# Altium integrated library MPPT_Charger_NB_IoT.IntLib: 60 symbols
Pins are listed as number, name and electrical type; pins without a type are passive.

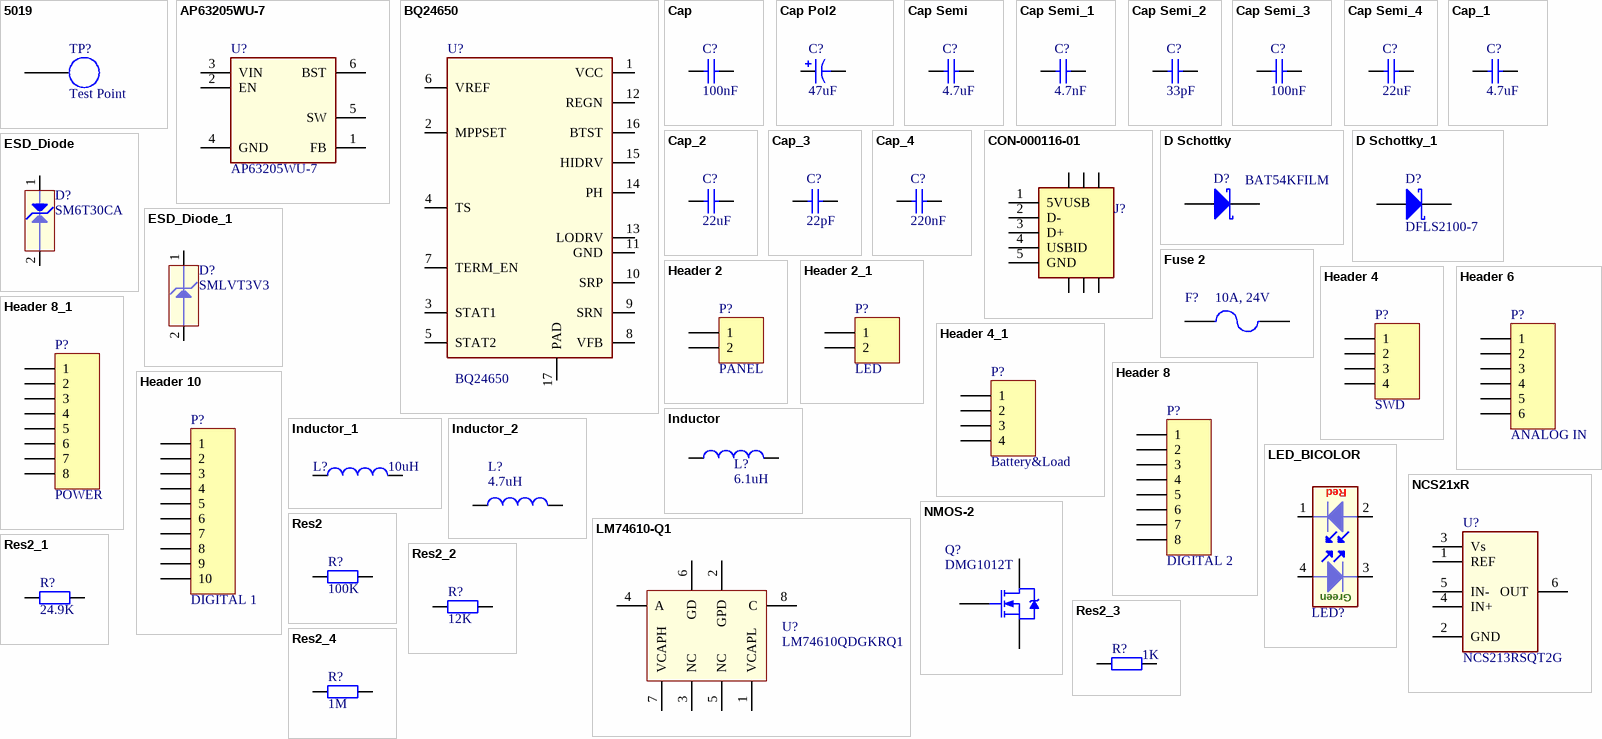
[diagram p0: symbols 5019 to Res2_4]

## 5019
designator TP?, comment Test Point
SMD Test Point; Manufacturer: Keystone Electronics; Manufacturer Part No.: 5019; Part Description: SMT Test Point; Specification: 3.81*2.03; Value: 5019; Supplier: DigiKey; Supplier part number: 36-5019CT-ND; Link: https://www.digikey.com/product-detail/en/keystone-electronics/5019/36-5019CT-ND/3907344
footprint 5019_keystone (Keystone Test Point 5019)
pins: 1

## AP63205WU-7
designator U?
SYNCHRONOUS BUCK WITH ENHANCED EMI REDUCTION; Manufacturer: Diodes Incorporated; Part Description: Buck Switching Regulator; Specification: 32V in, 5V, 2A; Link: https://www.digikey.com/product-detail/en/diodes-incorporated/AP63205WU-7/AP63205WU-7DICT-ND/9858428; Manufacturer Part No.: AP63205WU-7; Supplier: DigiKey; Supplier part number: AP63205WU-7DICT-ND; Value: AP63205WU-7
footprint SOT23-6_custom
pins: 1 FB, 2 EN, 3 VIN, 4 GND, 5 SW, 6 BST

## BQ24650
designator U?
Maximum Power Point Charger; Manufacturer: TI; Manufacturer Part No.: BQ24650RVAR; Part Description: Battery Charge Controller; Value: BQ24650RVAT; Specification: 28V, MPPT; Link: https://www.digikey.com/product-detail/en/texas-instruments/BQ24650RVAR/296-46287-1-ND/7033462; Supplier: DigiKey; Supplier part number: 296-46287-1-ND
footprint QFN-16_custom (Plastic Quad Flatpack 16 pins, 0.5 mm pitch)
pins: 1 VCC (power), 2 MPPSET (power), 3 STAT1 (power), 4 TS (power), 5 STAT2 (power), 6 VREF (power), 7 TERM_EN (power), 8 VFB (power), 9 SRN (power), 10 SRP (power), 11 GND (power), 12 REGN (power), 13 LODRV (power), 14 PH (power), 15 HIDRV (power), 16 BTST (power), 17 PAD (power)

## Cap
designator C?, comment value 100nF  (hidden comment: Capacitor ceramic)
Manufacturer: TDK Corporation; Manufacturer Part No.: CGA2B3X7R1V104K050BB; Part Description: Ceramic Capacitor; Specification: X7R, 35V, 10%; Link: https://www.digikey.com/product-detail/en/tdk-corporation/CGA2B3X7R1V104K050BB/445-6901-1-ND/2672919; Supplier: DigiKey; Supplier part number: 445-6901-1-ND
simulation model CAP (Capacitor)
signal-integrity model Cap
footprint C0402 (Chip Capacitor, 2-Leads, Body 1,0x0,5mm, IPC High Density)
pins: 1, 2

## Cap Pol2
designator C?, comment value 47uF  (hidden comment: Capacitor Tantalum)
Manufacturer: AVX Corporation; Manufacturer Part No.: TAJD476K016RNJ; Specification: TANT, 16V, 10%; Link: https://www.digikey.com/product-detail/en/avx-corporation/TAJD476K016RNJ/478-1739-1-ND/564771; Part Description: Capacitor Tantalum; Supplier: DigiKey; Supplier part number: 478-1739-1-ND
simulation model CAP (Capacitor)
signal-integrity model Cap Pol
footprint EIA-7343-31 (Chip Capacitor, Case D, 2-Leads, Body 7,3x4,3mm, IPC Medium Density)
pins: 1, 2
1 alternate drawing of the same symbol

## Cap Semi
designator C?, comment value 4.7uF  (hidden comment: Capacitor ceramic)
Manufacturer: Murata Electronics; Manufacturer Part No.: GRM219R6YA475KA73D; Part Description: Ceramic Capacitor; Specification: X5R, 35V, 10%; Supplier: DigiKey; Supplier part number: 490-7208-1-ND; Link: https://www.digikey.com/product-detail/en/murata-electronics/GRM219R6YA475KA73D/490-7208-1-ND/3900454
simulation model CAP (Semiconductor Capacitor)
signal-integrity model Cap Semi
footprint C0805 (Chip Capacitor, Body 2.0x1.3mm, IPC High Density)
pins: 1, 2

## Cap Semi_1
designator C?, comment value 4.7nF  (hidden comment: Capacitor ceramic)
Manufacturer: Yageo; Manufacturer Part No.: AC0402KRX7R9BB472; Part Description: Ceramic Capacitor; Specification: X7R, 50V, 10%; Supplier: DigiKey; Supplier part number: 311-3030-1-ND; Link: https://www.digikey.com/product-detail/en/yageo/AC0402KRX7R9BB472/311-3030-1-ND/6643281
simulation model CAP (Semiconductor Capacitor)
signal-integrity model Cap Semi
footprint C0402 (Chip Capacitor, 2-Leads, Body 1,0x0,5mm, IPC High Density)
pins: 1, 2

## Cap Semi_2
designator C?, comment value 33pF  (hidden comment: Capacitor ceramic)
Manufacturer: Yageo; Manufacturer Part No.: CC0402JRNPO9BN330; Part Description: Ceramic Capacitor; Specification: NP0, 50V, 5%; Supplier: DigiKey; Supplier part number: 311-1020-1-ND; Link: https://www.digikey.com/product-detail/en/yageo/CC0402JRNPO9BN330/311-1020-1-ND/302937
simulation model CAP (Semiconductor Capacitor)
signal-integrity model Cap Semi
footprint C0402 (Chip Capacitor, 2-Leads, Body 1,0x0,5mm, IPC High Density)
pins: 1, 2

## Cap Semi_3
designator C?, comment value 100nF  (hidden comment: Capacitor ceramic)
Manufacturer: TDK Corporation; Manufacturer Part No.: CGA2B3X7R1V104K050BB; Part Description: Ceramic Capacitor; Specification: X7R, 35V, 10%; Supplier: DigiKey; Supplier part number: 445-6901-1-ND; Link: https://www.digikey.com/product-detail/en/tdk-corporation/CGA2B3X7R1V104K050BB/445-6901-1-ND/2672919
simulation model CAP (Semiconductor Capacitor)
signal-integrity model Cap Semi
footprint C0402 (Chip Capacitor, 2-Leads, Body 1,0x0,5mm, IPC High Density)
pins: 1, 2

## Cap Semi_4
designator C?, comment value 22uF  (hidden comment: Capacitor ceramic)
Manufacturer: Taiyo Yuden; Manufacturer Part No.: GMK325BJ226MM-P; Part Description: Ceramic Capacitor; Specification: X5R, 35V, 20%; Supplier: DigiKey; Supplier part number: 587-5853-1-ND; Link: https://www.digikey.com/product-detail/en/taiyo-yuden/GMK325BJ226MM-P/587-5853-1-ND/7674973
simulation model CAP (Semiconductor Capacitor)
signal-integrity model Cap Semi
footprint C1210 (Chip Capacitor, Body 3.2x2.5mm, IPC High Density)
pins: 1, 2

## Cap_1
designator C?, comment value 4.7uF  (hidden comment: Capacitor ceramic)
Manufacturer: Murata Electronics; Manufacturer Part No.: GRM219R6YA475KA73D; Part Description: Ceramic Capacitor; Specification: X5R, 35V, 10%; Link: https://www.digikey.com/product-detail/en/murata-electronics/GRM219R6YA475KA73D/490-7208-1-ND/3900454; Supplier: DigiKey; Supplier part number: 490-7208-1-ND
simulation model CAP (Capacitor)
signal-integrity model Cap
footprint C0805 (Chip Capacitor, Body 2.0x1.3mm, IPC High Density)
pins: 1, 2

## Cap_2
designator C?, comment value 22uF  (hidden comment: Capacitor ceramic)
Manufacturer: Taiyo Yuden; Manufacturer Part No.: GMK325BJ226MM-P; Part Description: Ceramic Capacitor; Specification: X5R, 35V, 20%; Link: https://www.digikey.com/product-detail/en/taiyo-yuden/GMK325BJ226MM-P/587-5853-1-ND/7674973; Supplier: DigiKey; Supplier part number: 587-5853-1-ND
simulation model CAP (Capacitor)
signal-integrity model Cap
footprint C1210 (Chip Capacitor, Body 3.2x2.5mm, IPC High Density)
pins: 1, 2

## Cap_3
designator C?, comment value 22pF  (hidden comment: Capacitor ceramic)
Manufacturer: Yageo; Manufacturer Part No.: CC0402JRNPO9BN220; Part Description: Ceramic Capacitor; Specification: NPO, 50V, 5%; Link: https://www.digikey.com/product-detail/en/yageo/CC0402JRNPO9BN220/311-1018-1-ND/302935; Supplier: DigiKey; Supplier part number: 311-1018-1-ND
simulation model CAP (Capacitor)
signal-integrity model Cap
footprint C0402 (Chip Capacitor, 2-Leads, Body 1,0x0,5mm, IPC High Density)
pins: 1, 2

## Cap_4
designator C?, comment value 220nF  (hidden comment: Capacitor ceramic)
Manufacturer: Yageo; Manufacturer Part No.: CC0402KRX5R8BB224; Part Description: Ceramic Capacitor; Specification: X5R, 25V, 10%; Link: https://www.digikey.com/product-detail/en/yageo/CC0402KRX5R8BB224/311-3341-1-ND/6818311; Supplier: DigiKey; Supplier part number: 311-3341-1-ND
simulation model CAP (Capacitor)
signal-integrity model Cap
footprint C0402 (Chip Capacitor, 2-Leads, Body 1,0x0,5mm, IPC High Density)
pins: 1, 2

## CON-000116-01
designator J?  (value not drawn)
Manufacturer: Amphenol ICC (FCI); Manufacturer Part No.: 10118192-0001LF; Part Description: Micro USB Connector; Specification: Type B; Value: 10118192-0001LF; Supplier: DigiKey; Supplier part number: 609-4613-1-ND; Link: https://www.digikey.com/product-detail/en/amphenol-icc-fci/10118192-0001LF/609-4613-1-ND/2785378
footprint 10118192-0001LF
pins: 1 5VUSB, 2 D-, 3 D+, 4 USBID, 5 GND, 6, 7, 8, 9, 10, 11

## D Schottky
designator D?, comment BAT54KFILM
Schottky Diode; Manufacturer: STMicroelectronics; Part Description: Small signal Schottky diode; Specification: 40V, 0.3A; Manufacturer Part No.: BAT54KFILM; Supplier: DigiKey; Supplier part number: 497-5561-1-ND; Value: BAT54KFILM; Link: https://www.digikey.com/product-detail/en/stmicroelectronics/BAT54KFILM/497-5561-1-ND/1207053
simulation model SKYDIODE (Diode)
signal-integrity model D Schottky
footprint SOD-523
pins: 1 A, 2 K

## D Schottky_1
designator D?, comment DFLS2100-7
Schottky Diode; Manufacturer: Diodes Incorporated; Part Description: DIODE SCHOTTKY; Specification: 100V, 2A; Link: https://www.digikey.com/product-detail/en/diodes-incorporated/DFLS2100-7/DFLS2100-7DICT-ND/3451552; Value: DFLS2100-7; Manufacturer Part No.: DFLS2100-7; Supplier: DigiKey; Supplier part number: DFLS2100-7DICT-ND
simulation model SKYDIODE (Diode)
signal-integrity model D Schottky
footprint PowerDI123
pins: 1 A, 2 K

## ESD_Diode
designator D?, comment SM6T30CA
ESD Diode Symbol; Manufacturer: STMicroelectronics; Manufacturer Part No.: SM6T30CAY; Part Description: TVS DIODE; Specification: 30V, 0.6kW; Value: SM6T30CAY; Link: https://www.digikey.com/product-detail/en/stmicroelectronics/SM6T30CAY/497-10800-1-ND/2442951; Supplier: DigiKey; Supplier part number: 497-10800-1-ND
footprint DO-214AA
pins: 1 PIN1, 2 PIN2

## ESD_Diode_1
designator D?, comment SMLVT3V3
ESD Diode Symbol; Manufacturer: STMicroelectronics; Part Description: Low voltage Transil™; Specification: 3.3V, 0.6kW; Link: https://www.digikey.com/product-detail/en/stmicroelectronics/SMLVT3V3/497-2496-1-ND/603878; Manufacturer Part No.: SMLVT3V3; Supplier: DigiKey; Supplier part number: 497-2496-1-ND; Value: SMLVT3V3
footprint DO-214AA
pins: 1 PIN1, 2 PIN2

## Fuse 2
designator F?, comment 10A, 24V
SMD Fuse; Manufacturer: LITTELFUSE; Part Description: Fast Acting  Fuse; Value: 1206SFH100F/24-2; Specification: 100A; Link: https://uk.farnell.com/littelfuse/1206sfh100f-24-2/fuse-1206-10a/dp/1832124; Manufacturer Part No.: 1206SFH100F/24-2; Supplier: Farnell; Supplier part number: 1832124
simulation model FUSE (Spice Subcircuit)
footprint F1206 (Fuse in 1206 package)
pins: 1, 2

## Header 2
designator P?, comment PANEL
Header, 2-Pin; Manufacturer: SAURO; Part Description: Terminal block; Value: MSG02001; Specification: 2pos. 5mm,  24A, 300V; Link: https://www.sauro.net/products/MSG02001/?product_id=MSG02001; Manufacturer Part No.: MSG02001; Supplier: Rutronik; Supplier part number: COTERM5720
signal-integrity model Connector
footprint TERM2pin5mm (Terminal block 2 pins, 5 mm pitch)
pins: 1, 2

## Header 2_1
designator P?, comment LED
Header, 2-Pin; Manufacturer: SAURO; Part Description: Terminal block; Value: MSG02001; Specification: 2pos. 5mm,  24A, 300V; Link: https://www.sauro.net/products/MSG02001/?product_id=MSG02001; Manufacturer Part No.: MSG02001; Supplier: Rutronik; Supplier part number: COTERM5720
signal-integrity model Connector
footprint TERM2pin5mm (Terminal block 2 pins, 5 mm pitch)
pins: 1, 2

## Header 4
designator P?, comment SWD  (no BOM)
Header, 4-Pin; Manufacturer: Samtec Inc.; Manufacturer Part No.: SLW-104-01-G-S; Part Description: Receptacle Connector Through Hole; Specification: 4 pos. 2.54mm; Value: SLW-104-01-G-S; Link: https://www.digikey.com/products/en?keywords=SLW-104-01-G-S; Supplier: DigiKey; Supplier part number: SAM1089-04-ND
footprint HDR1X4 (Connector; Header; 4 Position)
signal-integrity model Connector
pins: 1, 2, 3, 4

## Header 4_1
designator P?, comment Battery&Load
Header, 4-Pin; Manufacturer: SAURO; Manufacturer Part No.: MSG04001; Part Description: Terminal block; Specification: 4 pos. 5mm,  24A, 300V; Value: MSG04001; Link: https://www.sauro.net/products/MSG04001/?product_id=MSG04001; Supplier: Rutronik; Supplier part number: COTERM6351
signal-integrity model Connector
footprint TERM4pin5mm (Terminal 4 pins, 5 mm pitch)
pins: 1, 2, 3, 4

## Header 6
designator P?, comment ANALOG IN  (no BOM)
Manufacturer: ADAM TECH; Manufacturer Part No.: RS1-06-G; Part Description: Arduino Connector; Specification: 6 pos. 2,54mm; Value: RS1-06-G; Supplier: Rutronik; Supplier part number: CONN2042; Link: http://www.adam-tech.com/products.php
footprint HDR1X6 (Connector; Header; 6 Position)
signal-integrity model Connector
pins: 1, 2, 3, 4, 5, 6

## Header 8
designator P?, comment DIGITAL 2  (no BOM)
Manufacturer: ADAM TECH; Manufacturer Part No.: RS1-08-G; Part Description: Arduino Connector; Specification: 8 pos. 2,54mm; Value: RS1-08-G; Supplier: Rutronik; Supplier part number: CONN2043; Link: http://www.adam-tech.com/products.php
footprint HDR1X8 (Connector; Header; 8 Position)
signal-integrity model Connector
pins: 1, 2, 3, 4, 5, 6, 7, 8

## Header 8_1
designator P?, comment POWER  (no BOM)
Manufacturer: ADAM TECH; Manufacturer Part No.: RS1-08-G; Part Description: Arduino Connector; Specification: 8 pos. 2,54mm; Value: RS1-08-G; Supplier: Rutronik; Supplier part number: CONN2043; Link: http://www.adam-tech.com/products.php
footprint HDR1X8 (Connector; Header; 8 Position)
signal-integrity model Connector
pins: 1, 2, 3, 4, 5, 6, 7, 8

## Header 10
designator P?, comment DIGITAL 1
Manufacturer: SparkFun Electronics; Manufacturer Part No.: PRT-11417; Part Description: ARDUINO STACKABLE HEADER KIT - R; Specification: 10 pos. 2,54mm; Value: PRT-11417; Supplier: DigiKey; Supplier part number: 1568-1413-ND; Link: https://www.digikey.com/product-detail/en/sparkfun-electronics/PRT-11417/1568-1413-ND/6161755
footprint HDR1X10 (Connector; Header; 10 Position)
signal-integrity model Connector
pins: 1, 2, 3, 4, 5, 6, 7, 8, 9, 10

## Inductor
designator L?, comment value 6.1uH  (hidden comment: Power Inductor)
Inductor; Manufacturer: Sumida America Components Inc.; Manufacturer Part No.: CDEP147NP-6R1MC-95; Specification: 11A, 20%; Link: https://www.digikey.com/product-detail/en/sumida-america-components-inc/CDEP147NP-6R1MC-95/308-1608-1-ND/3232383; Part Description: Power Inductor; Supplier: DigiKey; Supplier part number: 308-1608-1-ND
simulation model INDUCTOR (Inductor)
signal-integrity model Inductor
footprint CDEP147
pins: 1, 2

## Inductor_1
designator L?, comment value 10uH  (hidden comment: Power Inductor)
Inductor; Manufacturer: Murata Electronics; Manufacturer Part No.: LQH3NPN100MMEL; Specification: 0.8A, 20%; Link: https://www.digikey.com/product-detail/en/murata-electronics/LQH3NPN100MMEL/490-15945-1-ND/6800610; Part Description: Power Inductor; Supplier: DigiKey; Supplier part number: 490-15945-1-ND
simulation model INDUCTOR (Inductor)
signal-integrity model Inductor
footprint LQH3NP (Size Code 3030 (1212) in mm (in inch), 1.5mm max.Thickness. high performance type)
pins: 1, 2

## Inductor_2
designator L?, comment value 4.7uH  (hidden comment: Power Inductor)
Inductor; Manufacturer: Murata Electronics; Manufacturer Part No.: LQH3NPN4R7MMEL; Specification: 1A, 20%; Supplier: DigiKey; Supplier part number: 490-15954-1-ND; Part Description: Power Inductor; Link: https://www.digikey.com/product-detail/en/murata-electronics/LQH3NPN4R7MMEL/490-15954-1-ND/6800619
simulation model INDUCTOR (Inductor)
signal-integrity model Inductor
footprint LQH3NP (Size Code 3030 (1212) in mm (in inch), 1.5mm max.Thickness. high performance type)
pins: 1, 2

## LED_BICOLOR
designator LED?  (value not drawn)
Manufacturer: OSRAM Opto Semiconductors Inc.; Manufacturer Part No.: LSG T67K-JL-1+HK-1; Part Description: BICOLOR LED RED/GREEN CLEAR; Specification: SMT; Value: LSG T67K-JL-1+HK-1; Link: https://www.digikey.com/product-detail/en/osram-opto-semiconductors-inc/LSG-T67K-JL-1-HK-1/475-3435-1-ND/7908051; Supplier: DigiKey; Supplier part number: 475-3435-1-ND
footprint PLCC-4
pins: 1, 2, 3, 4
text: Red; Green

## LM74610-Q1
designator U?, comment LM74610QDGKRQ1
Smart Diode Controller; Manufacturer: TI; Specification: 42V, 30uA; Link: https://www.digikey.com/product-detail/en/texas-instruments/LM74610QDGKRQ1/296-43067-1-ND/5722225; Manufacturer Part No.: LM74610QDGKRQ1; Part Description: Smart Diode Controller; Supplier: DigiKey; Supplier part number: 296-43067-1-ND; Value: LM74610QDGKRQ1
footprint TSSOP-8 (Plasti Small-Outline Package)
pins: 1 VCAPL, 2 GPD, 3 NC, 4 A, 5 NC, 6 GD, 7 VCAPH, 8 C

## NCS21xR
designator U?, comment NCS213RSQT2G
Current-Shunt Monitor; Manufacturer: ON Semiconductor; Specification: x50, 80uA, 26V; Link: https://www.digikey.com/product-detail/en/on-semiconductor/NCS213RSQT2G/NCS213RSQT2GOSCT-ND/9169239; Manufacturer Part No.: NCS213RSQT2G; Part Description: Current-Shunt Monitor; Supplier: DigiKey; Supplier part number: NCS213RSQT2GOSCT-ND; Value: NCS213RSQT2G
footprint SOT-363
pins: 1 REF, 2 GND, 3 Vs, 4 IN+, 5 IN-, 6 OUT

## NMOS-2
designator Q?, comment DMG1012T
N-Channel Power MOSFET; Manufacturer: Diodes Incorporated; Manufacturer Part No.: DMG1012T-7; Part Description: N-Channel MOSFET; Specification: 20V, 0.63A; Value: DMG1012T-7; Supplier: DigiKey; Supplier part number: DMG1012T-7DICT-ND; Link: https://www.digikey.com/product-detail/en/diodes-incorporated/DMG1012T-7/DMG1012T-7DICT-ND/2181232
simulation model IRF1010 (Spice Subcircuit)
footprint SOT-523_custom
pins: 1 G, 2 D, 3 S

## Res2
designator R?, comment value 100K  (hidden comment: Resistor)
Manufacturer: Yageo; Manufacturer Part No.: RC0402JR-07100KL; Part Description: Thick Film Resistor; Specification: 5% 0,063W; Link: https://www.digikey.com/product-detail/en/yageo/RC0402JR-07100KL/311-100KJRCT-ND/729363; Supplier: DigiKey; Supplier part number: 311-100KJRCT-ND
simulation model RESISTOR (Resistor)
signal-integrity model Res
footprint R0402 (Chip resistor 0402)
pins: 1, 2

## Res2_1
designator R?, comment value 24.9K  (hidden comment: Resistor)
Manufacturer: Yageo; Manufacturer Part No.: RC0402FR-0724K9L; Part Description: Thick Film Resistor; Specification: 1% 0,063W; Link: https://www.digikey.com/product-detail/en/yageo/RC0402FR-0724K9L/311-24-9KLRCT-ND/729514; Supplier: DigiKey; Supplier part number: 311-24.9KLRCT-ND
simulation model RESISTOR (Resistor)
signal-integrity model Res
footprint R0402 (Chip resistor 0402)
pins: 1, 2

## Res2_2
designator R?, comment value 12K  (hidden comment: Resistor)
Manufacturer: Yageo; Manufacturer Part No.: RC0402JR-0712KL; Part Description: Thick Film Resistor; Specification: 5% 0,063W; Link: https://www.digikey.com/product-detail/en/yageo/RC0402JR-0712KL/311-12KJRCT-ND/729370; Supplier: DigiKey; Supplier part number: 311-12KJRCT-ND
simulation model RESISTOR (Resistor)
signal-integrity model Res
footprint R0402 (Chip resistor 0402)
pins: 1, 2

## Res2_3
designator R?, comment value 1K  (hidden comment: Resistor)
Manufacturer: Yageo; Manufacturer Part No.: AC0402JR-071KL; Part Description: Thick Film Resistor; Specification: 5% 0,063W; Link: https://www.digikey.com/product-detail/en/yageo/AC0402JR-071KL/YAG3525CT-ND/6006374; Supplier: DigiKey; Supplier part number: YAG3525CT-ND
simulation model RESISTOR (Resistor)
signal-integrity model Res
footprint R0402 (Chip resistor 0402)
pins: 1, 2

## Res2_4
designator R?, comment value 1M  (hidden comment: Resistor)
Manufacturer: Yageo; Manufacturer Part No.: RC0402FR-071ML; Part Description: Thick Film Resistor; Specification: 1% 0,063W; Supplier: DigiKey; Supplier part number: 311-1.00MLRCT-ND; Link: https://www.digikey.com/product-detail/en/yageo/RC0402FR-071ML/311-1-00MLRCT-ND/729462
simulation model RESISTOR (Resistor)
signal-integrity model Res
footprint R0402 (Chip resistor 0402)
pins: 1, 2

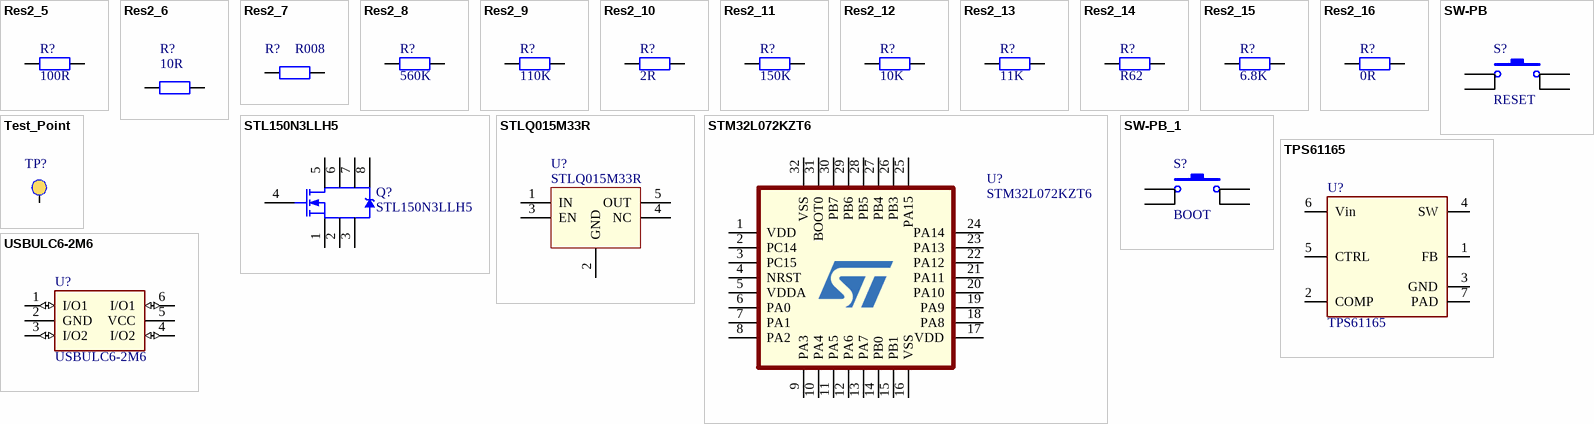
[diagram p1: symbols Res2_5 to USBULC6-2M6]

## Res2_5
designator R?, comment value 100R  (hidden comment: Resistor)
Manufacturer: Yageo; Manufacturer Part No.: SR0402JR-7W100RL; Part Description: Thick Film Resistor; Specification: 5% 0.125W; Supplier: DigiKey; Supplier part number: YAG6156CT-ND; Link: https://www.digikey.com/product-detail/en/yageo/SR0402JR-7W100RL/YAG6156CT-ND/9696610
simulation model RESISTOR (Resistor)
signal-integrity model Res
footprint R0402 (Chip resistor 0402)
pins: 1, 2

## Res2_6
designator R?, comment value 10R  (hidden comment: Resistor)
Manufacturer: Yageo; Manufacturer Part No.: RC0805JR-07510RL; Part Description: Thick Film Resistor; Specification: 5% 0.125W; Link: https://www.digikey.com/product-detail/en/yageo/RC0805JR-07510RL/311-510ARCT-ND/731290; Supplier: DigiKey; Supplier part number: 311-510ARCT-ND
simulation model RESISTOR (Resistor)
signal-integrity model Res
footprint R0805 (Chip Resistor, 2-Leads, Body 2,0x1,3mm, IPC High Density)
pins: 1, 2

## Res2_7
designator R?, comment value R008  (hidden comment: Resistor)
Manufacturer: Rohm Semiconductor; Manufacturer Part No.: PMR50HZPFU8L00; Part Description: Thick Film Resistor; Specification: 1% 1W; Link: https://www.digikey.com/product-detail/en/rohm-semiconductor/PMR50HZPFU8L00/RHM-008ASCT-ND/2094542; Supplier: DigiKey; Supplier part number: RHM.008ASCT-ND
simulation model RESISTOR (Resistor)
signal-integrity model Res
footprint R2010 (Chip Capacitor, 2-Leads, Body 5.3x2.6mm, IPC Medium Density)
pins: 1, 2

## Res2_8
designator R?, comment value 560K  (hidden comment: Resistor)
Manufacturer: Yageo; Manufacturer Part No.: RC0402JR-07560KL; Part Description: Thick Film Resistor; Specification: 5% 0,063W; Link: https://www.digikey.com/product-detail/en/yageo/RC0402JR-07560KL/311-560KJRCT-ND/729440; Supplier: DigiKey; Supplier part number: 311-560KJRCT-ND
simulation model RESISTOR (Resistor)
signal-integrity model Res
footprint R0402 (Chip resistor 0402)
pins: 1, 2

## Res2_9
designator R?, comment value 110K  (hidden comment: Resistor)
Manufacturer: Yageo; Manufacturer Part No.: RC0402JR-07110KL; Part Description: Thick Film Resistor; Specification: 5% 0,063W; Link: https://www.digikey.com/product-detail/en/yageo/RC0402JR-07110KL/311-110KJRCT-ND/729366; Supplier: DigiKey; Supplier part number: 311-110KJRCT-ND
simulation model RESISTOR (Resistor)
signal-integrity model Res
footprint R0402 (Chip resistor 0402)
pins: 1, 2

## Res2_10
designator R?, comment value 2R  (hidden comment: Resistor)
Manufacturer: Yageo; Manufacturer Part No.: RC0805JR-072RL; Part Description: Thick Film Resistor; Specification: 5% 0.125W; Link: https://www.digikey.com/product-detail/en/yageo/RC0805JR-072RL/311-2-0ARCT-ND/731214; Supplier: DigiKey; Supplier part number: 311-2.0ARCT-ND
simulation model RESISTOR (Resistor)
signal-integrity model Res
footprint R0805 (Chip Resistor, 2-Leads, Body 2,0x1,3mm, IPC High Density)
pins: 1, 2

## Res2_11
designator R?, comment value 150K  (hidden comment: Resistor)
Manufacturer: Yageo; Manufacturer Part No.: RC0402JR-07150KL; Part Description: Thick Film Resistor; Specification: 5% 0,063W; Link: https://www.digikey.com/product-detail/en/yageo/RC0402JR-07150KL/311-150KJRCT-ND/729372; Supplier: DigiKey; Supplier part number: 311-150KJRCT-ND
simulation model RESISTOR (Resistor)
signal-integrity model Res
footprint R0402 (Chip resistor 0402)
pins: 1, 2

## Res2_12
designator R?, comment value 10K  (hidden comment: Resistor)
Manufacturer: Yageo; Manufacturer Part No.: RC0100JR-0710KL; Part Description: Thick Film Resistor; Specification: 5% 0.03W; Link: https://www.digikey.com/product-detail/en/yageo/RC0100JR-0710KL/311-10KDHCT-ND/2254412; Supplier: DigiKey; Supplier part number: 311-10KDHCT-ND
simulation model RESISTOR (Resistor)
signal-integrity model Res
footprint R0402 (Chip resistor 0402)
pins: 1, 2

## Res2_13
designator R?, comment value 11K  (hidden comment: Resistor)
Manufacturer: Yageo; Manufacturer Part No.: RC0402JR-0711KL; Part Description: Thick Film Resistor; Specification: 5% 0,063W; Link: https://www.digikey.com/product-detail/en/yageo/RC0402JR-0711KL/311-11KJRCT-ND/729367; Supplier: DigiKey; Supplier part number: 311-11KJRCT-ND
simulation model RESISTOR (Resistor)
signal-integrity model Res
footprint R0402 (Chip resistor 0402)
pins: 1, 2

## Res2_14
designator R?, comment value R62  (hidden comment: Resistor)
Manufacturer: Panasonic Electronic Components; Manufacturer Part No.: ERJ-8RQFR62V; Part Description: Thick Film Resistor; Specification: 1% 0.25W; Link: https://www.digikey.com/product-detail/en/panasonic-electronic-components/ERJ-8RQFR62V/P-62RCT-ND/3982353; Supplier: DigiKey; Supplier part number: P.62RCT-ND
simulation model RESISTOR (Resistor)
signal-integrity model Res
footprint R1206 (Chip Resistor, 2-Leads, Body 3,2x1,6mm, IPC High Density)
pins: 1, 2

## Res2_15
designator R?, comment value 6.8K  (hidden comment: Resistor)
Manufacturer: Yageo; Manufacturer Part No.: RC0402JR-076K8L; Part Description: Thick Film Resistor; Specification: 5% 0,063W; Link: https://www.digikey.com/product-detail/en/yageo/RC0402JR-076K8L/311-6-8KJRCT-ND/729444; Supplier: DigiKey; Supplier part number: 311-6.8KJRCT-ND
simulation model RESISTOR (Resistor)
signal-integrity model Res
footprint R0402 (Chip resistor 0402)
pins: 1, 2

## Res2_16
designator R?, comment value 0R  (hidden comment: Resistor)
Manufacturer: Yageo; Manufacturer Part No.: RC1206JR-070RL; Part Description: Thick Film Resistor; Specification: 0.25W; Supplier: DigiKey; Supplier part number: 311-0.0ERDKR-ND; Link: https://www.digikey.com/product-detail/en/yageo/RC1206JR-070RL/311-0-0ERDKR-ND/735078
simulation model RESISTOR (Resistor)
signal-integrity model Res
footprint R1206 (Chip Resistor, 2-Leads, Body 3,2x1,6mm, IPC High Density)
pins: 1, 2

## STL150N3LLH5
designator Q?
Power MOSFET N-channel; Manufacturer: STMicroelectronics; Part Description: P-channel Power MOSFET; Specification: 30V, 35A; Manufacturer Part No.: STL150N3LLH5; Supplier: Farnell; Supplier part number: 1752112RL; Value: STL150N3LLH5; Link: https://uk.farnell.com/stmicroelectronics/stl150n3llh5/mosfet-n-ch-30v-35a-powerflat6x5/dp/1752112RL
footprint PowerFLAT 5x6
pins: 1 S, 2 S, 3 S, 4 G, 5 D, 6 D, 7 D, 8 D

## STLQ015M33R
designator U?
Ultra low quiescent current linear voltage regulator; Manufacturer: STMicroelectronics; Specification: 5.5V in, 3.3V, 150mA; Link: https://www.digikey.com/product-detail/en/stmicroelectronics/STLQ015M33R/497-15934-1-ND/5398723; Manufacturer Part No.: STLQ015M33R; Part Description: Linear Voltage Regulator; Supplier: DigiKey; Supplier part number: 497-15934-1-ND; Value: STLQ015M33R
footprint SOT23-5L (SOT23, 5-Leads, Body 2,90x2,80mm, Pitch 0,95mm, IPC Medium Density)
pins: 1 IN, 2 GND, 3 EN, 4 NC, 5 OUT

## STM32L072KZT6
designator U?
Ultra-low-power 32-bit MCU Arm®-based Cortex®-M0+; Manufacturer: STMicroelectronics; Specification: 192KB, 20KB, 1.65V-3.6V; Link: https://www.digikey.com/products/en?keywords=STM32L072KZT6; Manufacturer Part No.: STM32L072KZT6; Part Description: Ultra-low-power 32-bit MCU Arm®-based Cortex®-M0+; Supplier: DigiKey; Supplier part number: 497-19668-ND; Value: STM32L072KZT6
footprint LQFP32 (LQFP32, 32-Leads, Body 7,00x7,00mm, Pitch 0,80mm, IPC Medium Density)
pins: 1 VDD, 2 PC14, 3 PC15, 4 NRST, 5 VDDA, 6 PA0, 7 PA1, 8 PA2, 9 PA3, 10 PA4, 11 PA5, 12 PA6, 13 PA7, 14 PB0, 15 PB1, 16 VSS, 17 VDD, 18 PA8, 19 PA9, 20 PA10, 21 PA11, 22 PA12, 23 PA13, 24 PA14, 25 PA15, 26 PB3, 27 PB4, 28 PB5, 29 PB6, 30 PB7, 31 BOOT0, 32 VSS

## SW-PB
designator S?, comment RESET
Switch; Manufacturer: Panasonic; Manufacturer Part No.: EVQPUJ02K; Part Description: Tactile Button; Specification: 1.6N, Right Angle, 50mA; Value: EVQPUJ02K; Supplier: DigiKey; Supplier part number: P10851SCT-ND; Link: https://www.digikey.com/product-detail/en/panasonic-electronic-components/EVQ-PUJ02K/P10851SCT-ND/286352
footprint EVQPUA (Light Touch Switches/EVQPU)
pins: 1, 2, 3, 4

## SW-PB_1
designator S?, comment BOOT
Switch; Manufacturer: Panasonic; Manufacturer Part No.: EVQPUJ02K; Part Description: Tactile Button; Specification: 1.6N, Right Angle, 50mA; Value: EVQPUJ02K; Supplier: DigiKey; Supplier part number: P10851SCT-ND; Link: https://www.digikey.com/product-detail/en/panasonic-electronic-components/EVQ-PUJ02K/P10851SCT-ND/286352
footprint EVQPUA (Light Touch Switches/EVQPU)
pins: 1, 2, 3, 4

## Test_Point
designator TP?  (value not drawn)  (no BOM)
Test Point
footprint TEST_POINT (Rounded Corners Test Point)
pins: 0

## TPS61165
designator U?
HBLED Driver; Manufacturer: TI; Part Description: Boost LED DRiver; Value: TPS61165DRVT; Specification: 18V in, 38V, 350mA; Link: https://www.digikey.com/product-detail/en/texas-instruments/TPS61165DRVT/296-27015-1-ND/2255302; Manufacturer Part No.: TPS61165DRVT; Supplier: DigiKey; Supplier part number: 296-27015-1-ND
footprint QFN-6_custom (QFN, 6-Leads, Body 2,1x2,1mm (max), Pitch 0,65mm, IPC Low Density)
pins: 1 FB, 2 COMP, 3 GND, 4 SW, 5 CTRL, 6 Vin, 7 PAD

## USBULC6-2M6
designator U?
Ultra large bandwidth ESD protection; Manufacturer: STMicroelectronics; Specification: 6V, 0.6pF; Link: https://www.digikey.com/product-detail/en/stmicroelectronics/USBULC6-2M6/497-7044-1-ND/1880382; Manufacturer Part No.: USBULC6-2M6; Part Description: Ultra large bandwidth ESD protection; Supplier: DigiKey; Supplier part number: 497-7044-1-ND; Value: USBULC6-2M6
footprint Micro_QFN_6L (1.45x1.00)
pins: 1 I/O1 (io), 2 GND (power), 3 I/O2 (io), 4 I/O2 (io), 5 VCC (power), 6 I/O1 (io)